# Altium footprint library MAL214658471E3.PcbLib: 1 footprints
Each footprint in its own frame and in the unit in brackets; x right, y up, seen from the top. Pads: shape width x height; smd on the part's side, far side on the other; paste and mask are expansions set on the pad; w line width, h text height; cw(c..) or ccw(c..) is an arc to the next point about the centre after c.
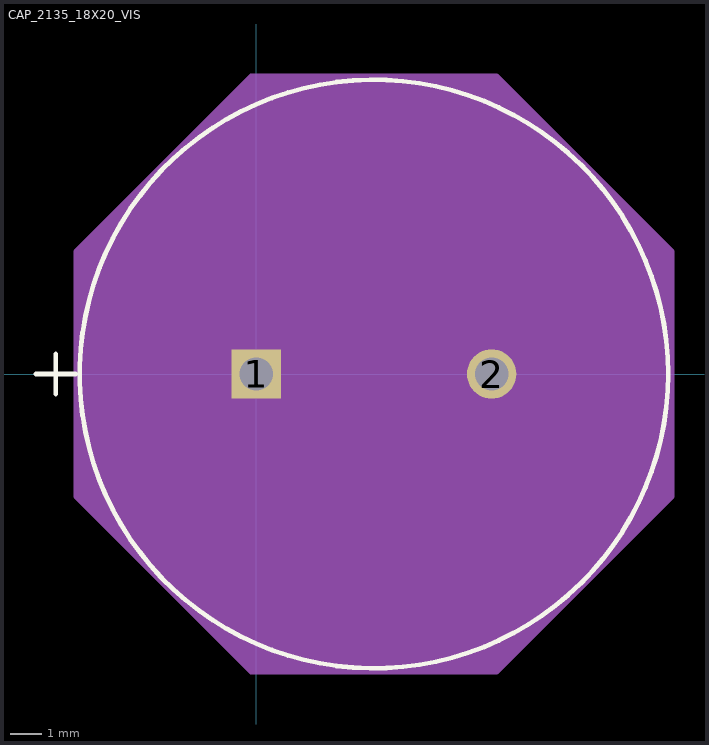
[diagram p0: the footprint, top view; thin cyan lines are the x and y axes]

## CAP_2135_18X20_VIS [mil]
pads (2):
  rect 62x62 hole 42 paste-31 mask+0: 1(0,0)
  round 62 hole 42 paste-31 mask+0: 2(295.28,0)
Top Overlay:
  circle w6: c147.64,0 r369
  lines w6: -276.36,0 -226.36,0 ; -251.36,-25 -251.36,25
  text ".Designator" at 10.14,-25 h50
Mechanical 13:
  circle w1: c147.64,0 r364
  lines w1: -276.36,0 -226.36,0 ; -251.36,-25 -251.36,25
  text ".Designator" at 10.14,-25 h50
Mechanical 15:
  region: -226.36,154 -6.36,374 301.64,374 521.64,154 521.64,-154 301.64,-374 -6.36,-374 -226.36,-154
  lines w6: -226.36,-154 -6.36,-374 301.64,-374 521.64,-154 521.64,154 301.64,374 -6.36,374 -226.36,154 -226.36,-154
3D body "CAP_2135_18X20_VIS.step": height 866.61, standoff -195.98, extent -216.38,-363.87 513.03,363.87